# Altium footprint library Footprint.PcbLib: 411 footprints (part 24 of 26)
Each footprint in its own frame and in the unit in brackets; x right, y up, seen from the top. Pads: shape width x height; smd on the part's side, far side on the other; paste and mask are expansions set on the pad; w line width, h text height; cw(c..) or ccw(c..) is an arc to the next point about the centre after c.
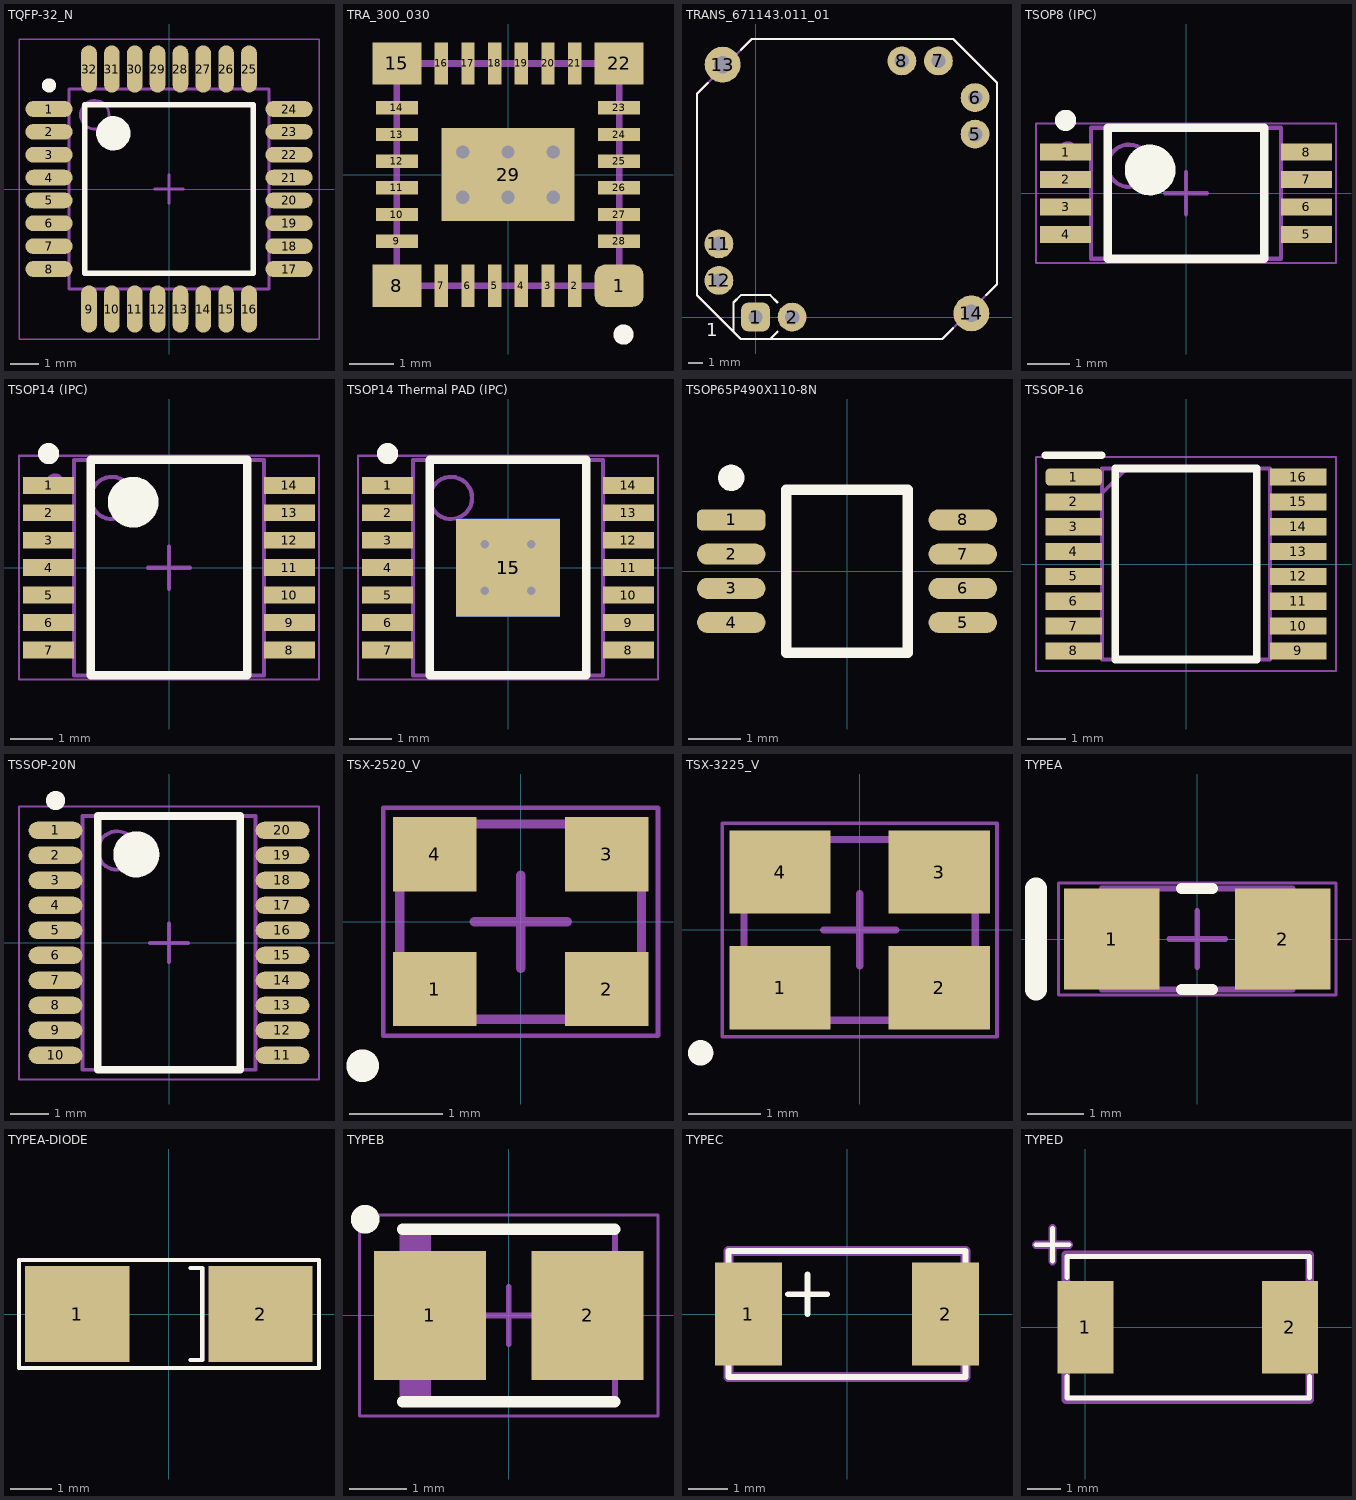
[diagram p23: the footprints below, top view; thin cyan lines are the x and y axes]

## TQFP-32_N [mm] "Thin QFP, 32-Leads, Body 7x7mm, Pitch 0.8mm, IPC Medium Density"
height 1.2
pads (32):
  oval 1.65x0.55 smd: 1(-4.2,2.8) 2(-4.2,2) 3(-4.2,1.2) 4(-4.2,0.4) 5(-4.2,-0.4) 6(-4.2,-1.2) 7(-4.2,-2) 8(-4.2,-2.8) 17(4.2,-2.8) 18(4.2,-2) 19(4.2,-1.2) 20(4.2,-0.4) 21(4.2,0.4) 22(4.2,1.2) 23(4.2,2) 24(4.2,2.8)
  oval 0.55x1.65 smd: 9(-2.8,-4.2) 10(-2,-4.2) 11(-1.2,-4.2) 12(-0.4,-4.2) 13(0.4,-4.2) 14(1.2,-4.2) 15(2,-4.2) 16(2.8,-4.2) 25(2.8,4.2) 26(2,4.2) 27(1.2,4.2) 28(0.4,4.2) 29(-0.4,4.2) 30(-1.2,4.2) 31(-2,4.2) 32(-2.8,4.2)
Top Overlay:
  circle w0.6: c-1.95,1.95 r0.3
  circle w0.25: c-4.2,3.625 r0.125
  lines w0.2: -2.95,-2.95 2.95,-2.95 2.95,2.95 -2.95,2.95 -2.95,-2.95
Mechanical 13:
  circle w0.1: c-2.6,2.6 r0.5
  lines w0.1: -3.5,-3.5 3.5,-3.5 3.5,3.5 -3.5,3.5 -3.5,-3.5
Mechanical 15:
  lines w0.05: -5.25,-5.25 5.25,-5.25 5.25,5.25 -5.25,5.25 -5.25,-5.25
  lines w0.1: -0.5,0 0.5,0 ; 0,-0.5 0,0.5
3D body "TQFP32_CMA_MCH.step": height 1.2, standoff 0, extent -4.496,-4.496 4.496,4.496

## TRA_300_030 [mm]
pads (29):
  rrect50% 1.1x0.95 smd: 1(2.5,-2.5)
  rect 0.3x0.95 smd: 2(1.5,-2.5) 3(0.9,-2.5) 4(0.3,-2.5) 5(-0.3,-2.5) 6(-0.9,-2.5) 7(-1.5,-2.5) 16(-1.5,2.5) 17(-0.9,2.5) 18(-0.3,2.5) 19(0.3,2.5) 20(0.9,2.5) 21(1.5,2.5)
  rect 1.1x0.95 smd: 8(-2.5,-2.5) 15(-2.5,2.5) 22(2.5,2.5)
  rect 0.95x0.3 smd: 9(-2.5,-1.5) 10(-2.5,-0.9) 11(-2.5,-0.3) 12(-2.5,0.3) 13(-2.5,0.9) 14(-2.5,1.5) 23(2.5,1.5) 24(2.5,0.9) 25(2.5,0.3) 26(2.5,-0.3) 27(2.5,-0.9) 28(2.5,-1.5)
  rect 3x2.1 smd: 29(0,0)
via -1.016,-0.508 diameter 0.6 hole 0.3
via 0,-0.508 diameter 0.6 hole 0.3
via 1.016,-0.508 diameter 0.6 hole 0.3
via 1.016,0.508 diameter 0.6 hole 0.3
via 0,0.508 diameter 0.6 hole 0.3
via -1.016,0.508 diameter 0.6 hole 0.3
Top Overlay:
  circle w0.254: c2.6,-3.6 r0.1
Mechanical 1:
  lines w0.15: -2.5,-2.5 2.5,-2.5 2.5,2.5 -2.5,2.5 -2.5,-2.5
3D body: height 1, standoff 0, extent -2.5,-2.5 2.5,2.5

## TRANS_671143.011_01 [mm]
pads (10):
  rrect50% 2x2 hole 1: 1(0,0)
  round 2 hole 1: 2(2.54,0) 5(15.24,12.7) 6(15.24,15.24) 7(12.7,17.78) 8(10.16,17.78) 11(-2.54,5.08) 12(-2.54,2.54)
  round 2.5 hole 1.2: 13(-2.286,17.526) 14(14.986,0.254)
Top Overlay:
  lines w0.15: -3.302,16.256 -4.064,15.494 -4.064,1.524 -1.016,-1.524 12.954,-1.524 13.716,-0.762 ; -1.524,-1.016 -1.524,1.016 -1.016,1.524 1.016,1.524 1.524,1.016 ; -1.016,18.542 -0.254,19.304 13.716,19.304 16.764,16.256 16.764,2.286 16.002,1.524 ; 1.016,-1.524 1.524,-1.016
  text "1" at -3.429,-1.35 h0.9
Mechanical 1:
  lines w0.15: -0.26,19.3 -4.064,15.494 -4.064,1.524 -1.016,-1.524 12.954,-1.524 16.76,2.28 ; -0.254,19.304 13.716,19.304 16.764,16.256 16.764,2.286
  text "1" at -0.56,-0.79 h0.95
3D body: height 16.3, standoff 0, extent -4.064,-1.524 16.764,19.304
3D body: height 16.4, standoff 0, extent -0.744,-0.748 0.75,0.749

## TSOP8 (IPC) [mm] "TSOP, 8-Leads, Body 3.00x4.40mm, Pitch 0.65mm, IPC High Density"
height 1.2
pads (8):
  rect 1.2x0.4 smd: 1(-2.85,0.975) 2(-2.85,0.325) 3(-2.85,-0.325) 4(-2.85,-0.975) 5(2.85,-0.975) 6(2.85,-0.325) 7(2.85,0.325) 8(2.85,0.975)
Top Overlay:
  circle w0.6: c-0.85,0.55 r0.3
  circle w0.25: c-2.85,1.725 r0.125
  lines w0.2: -1.85,-1.55 1.85,-1.55 1.85,1.55 -1.85,1.55 -1.85,-1.55
Mechanical 13:
  circle w0.1: c-1.35,0.65 r0.5
  lines w0.1: -2.25,-1.55 2.25,-1.55 2.25,1.55 -2.25,1.55 -2.25,-1.55
Mechanical 15:
  circle w0.254: c-2.8,1 r0.1
  lines w0.05: -3.55,-1.65 3.55,-1.65 3.55,1.65 -3.55,1.65 -3.55,-1.65
  lines w0.1: -0.5,0 0.5,0 ; 0,-0.5 0,0.5
  text ".Designator" at -2.5,2 h1.52
3D body "TSOP65P640X120-8L.step": height 1.2, standoff 0, extent -3.2,-1.55 3.2,1.55

## TSOP14 (IPC) [mm] "TSOP, 14-Leads, Body 5.00x4.40mm, Pitch 0.65mm, IPC High Density"
height 1.2
pads (14):
  rect 1.2x0.4 smd: 1(-2.85,1.95) 2(-2.85,1.3) 3(-2.85,0.65) 4(-2.85,0) 5(-2.85,-0.65) 6(-2.85,-1.3) 7(-2.85,-1.95) 8(2.85,-1.95) 9(2.85,-1.3) 10(2.85,-0.65) 11(2.85,0) 12(2.85,0.65) 13(2.85,1.3) 14(2.85,1.95)
Top Overlay:
  circle w0.25: c-2.85,2.7 r0.125
  circle w0.6: c-0.85,1.55 r0.3
  lines w0.2: -1.85,-2.55 -1.85,2.55 1.85,2.55 1.85,-2.55 -1.85,-2.55
Mechanical 13:
  circle w0.1: c-1.35,1.65 r0.5
  lines w0.1: -2.25,-2.55 -2.25,2.55 2.25,2.55 2.25,-2.55 -2.25,-2.55
Mechanical 15:
  circle w0.254: c-2.7,2 r0.1
  lines w0.05: -3.55,-2.65 -3.55,2.65 3.55,2.65 3.55,-2.65 -3.55,-2.65
  lines w0.1: -0.5,0 0.5,0 ; 0,-0.5 0,0.5
  text ".Designator" at -2.5,3 h1.52
3D body "TSOP65P640X120-14L.step": height 1.2, standoff 0, extent -3.2,-2.55 3.2,2.55

## TSOP14 Thermal PAD (IPC) [mm] "TSOP, 14-Leads, Body 4.85x4.40mm, Pitch 0.65mm, Thermal Pad 2.31x2.46mm, IPC High Density"
height 1.2
pads (16):
  rect 1.2x0.4 smd: 1(-2.85,1.95) 2(-2.85,1.3) 3(-2.85,0.65) 4(-2.85,0) 5(-2.85,-0.65) 6(-2.85,-1.3) 7(-2.85,-1.95) 8(2.85,-1.95) 9(2.85,-1.3) 10(2.85,-0.65) 11(2.85,0) 12(2.85,0.65) 13(2.85,1.3) 14(2.85,1.95)
  rect 2.46x2.31 smd: 15(0,0)
  rect 2.46x2.31 smd far side: 15(0,0)
via 0.55,-0.55 diameter 0.5 hole 0.2
via -0.55,-0.55 diameter 0.5 hole 0.2
via 0.55,0.55 diameter 0.5 hole 0.2
via -0.55,0.55 diameter 0.5 hole 0.2
Top Overlay:
  circle w0.25: c-2.85,2.7 r0.125
  lines w0.2: -1.85,-2.55 1.85,-2.55 1.85,2.55 -1.85,2.55 -1.85,-2.55
Mechanical 15:
  circle w0.1: c-1.35,1.65 r0.5
  lines w0.05: -3.55,-2.65 3.55,-2.65 3.55,2.65 -3.55,2.65 -3.55,-2.65
  lines w0.1: -0.5,0 0.5,0 ; 0,-0.5 0,0.5 ; -2.25,-2.55 2.25,-2.55 2.25,2.55 -2.25,2.55 -2.25,-2.55
  text ".Designator" at -2.5,3 h1.52
3D body "TSOP65P640X120_HS-15L.step": height 1.2, standoff 0, extent -3.2,-2.55 3.2,2.55

## TSOP65P490X110-8N [mm] "TSOP, 8-Leads, Body 3,00x3,00mm, Pitch 0,65mm, IPC Medium Density"
height 1.1
pads (8):
  rrect50% 1.3x0.4 smd: 1(-2.2,0.975)
  oval 1.3x0.4 smd: 2(-2.2,0.325) 3(-2.2,-0.325) 4(-2.2,-0.975) 5(2.2,-0.975) 6(2.2,-0.325) 7(2.2,0.325) 8(2.2,0.975)
Top Overlay:
  circle w0.25: c-2.2,1.775 r0.125
  lines w0.2: -1.15,-1.55 -1.15,1.55 1.15,1.55 1.15,-1.55 -1.15,-1.55
3D body "TSOP65P490X110-8N.step": height 1.1, standoff 0, extent -2.45,-1.55 2.45,1.55

## TSSOP-16 [mm]
pads (16):
  rrect50% 1.475x0.45 smd: 1(-2.938,2.275)
  rect 1.475x0.45 smd: 2(-2.938,1.625) 3(-2.938,0.975) 4(-2.938,0.325) 5(-2.938,-0.325) 6(-2.938,-0.975) 7(-2.938,-1.625) 8(-2.938,-2.275) 9(2.938,-2.275) 10(2.938,-1.625) 11(2.938,-0.975) 12(2.938,-0.325) 13(2.938,0.325) 14(2.938,0.975) 15(2.938,1.625) 16(2.938,2.275)
Top Overlay:
  lines w0.2: -3.675,2.85 -2.2,2.85 ; -1.85,-2.5 -1.85,2.5 1.85,2.5 1.85,-2.5 -1.85,-2.5
Mechanical 13:
  lines w0.1: -2.2,1.85 -1.55,2.5 ; -2.2,-2.5 -2.2,2.5 2.2,2.5 2.2,-2.5 -2.2,-2.5
Mechanical 15:
  lines w0.05: -3.925,-2.8 -3.925,2.8 3.925,2.8 3.925,-2.8 -3.925,-2.8
3D body "ADG709BRUZ.stp": height 1.2, standoff 0, extent -3.2,-2.5 3.2,2.5

## TSSOP-20N [mm] "TSSOP, 20-Leads, Body 6,50x4,40mm, Pitch 0,65mm, IPC Medium Density"
height 1.2
pads (20):
  oval 1.4x0.45 smd: 1(-2.95,2.925) 2(-2.95,2.275) 3(-2.95,1.625) 4(-2.95,0.975) 5(-2.95,0.325) 6(-2.95,-0.325) 7(-2.95,-0.975) 8(-2.95,-1.625) 9(-2.95,-2.275) 10(-2.95,-2.925) 11(2.95,-2.925) 12(2.95,-2.275) 13(2.95,-1.625) 14(2.95,-0.975) 15(2.95,-0.325) 16(2.95,0.325) 17(2.95,0.975) 18(2.95,1.625) 19(2.95,2.275) 20(2.95,2.925)
Top Overlay:
  circle w0.6: c-0.85,2.3 r0.3
  circle w0.25: c-2.95,3.7 r0.125
  lines w0.2: -1.85,-3.3 1.85,-3.3 1.85,3.3 -1.85,3.3 -1.85,-3.3
Assembly Top:
  circle w0.1: c-1.35,2.4 r0.5
  lines w0.1: -2.25,-3.3 2.25,-3.3 2.25,3.3 -2.25,3.3 -2.25,-3.3
Courtyard Top:
  lines w0.05: -3.9,-3.55 3.9,-3.55 3.9,3.55 -3.9,3.55 -3.9,-3.55
  lines w0.1: -0.5,0 0.5,0 ; 0,-0.5 0,0.5
3D body "TSSOP-20N.step": height 1.2, standoff 0, extent -3.2,-3.3 3.2,3.3

## TSX-2520_V [mm] "SMD, 4-Leads, Body 2.5x2.0mm"
height 0.9
pads (4):
  rect 0.9x0.8 smd: 1(-0.925,-0.725) 2(0.925,-0.725) 3(0.925,0.725) 4(-0.925,0.725)
Top Overlay:
  circle w0.25: c-1.7,-1.55 r0.05
Mechanical 13:
  lines w0.1: -1.3,-1.05 1.3,-1.05 1.3,1.05 -1.3,1.05 -1.3,-1.05
Mechanical 15:
  lines w0.05: -1.477,-1.227 -1.477,1.227 1.477,1.227 1.477,-1.227 -1.477,-1.227
  lines w0.1: -0.5,0 0.5,0 ; 0,-0.5 0,0.5
3D body: height 0.9, standoff 0, extent -1.29,-1.051 1.3,1.054

## TSX-3225_V [mm] "SMD, 4-Leads, Body 3.2x2.5mm"
height 0.6
pads (4):
  rect 1.4x1.15 smd: 1(-1.1,-0.8) 2(1.1,-0.8) 3(1.1,0.8) 4(-1.1,0.8)
Top Overlay:
  circle w0.25: c-2.2,-1.7 r0.05
Mechanical 13:
  lines w0.1: -1.6,-1.25 -1.6,1.25 1.6,1.25 1.6,-1.25 -1.6,-1.25
Mechanical 15:
  lines w0.05: -1.9,-1.475 1.9,-1.475 1.9,1.475 -1.9,1.475 -1.9,-1.475
  lines w0.1: -0.5,0 0.5,0 ; 0,-0.5 0,0.5
3D body: height 0.6, standoff 0, extent -1.6,-1.25 1.6,1.25

## TYPEA [mm] "Molded Capacitor, 2-Leads, Body 3.40x1.80mm"
height 1.8
pads (2):
  rect 1.7x1.8 smd: 1(-1.525,0) 2(1.525,0)
Top Overlay:
  lines w0.2: -0.275,-0.9 0.275,-0.9 ; -0.275,0.9 0.275,0.9
  lines w0.4: -2.875,-0.9 -2.875,0.9
Mechanical 13:
  rectangle: -1.7,-0.9 -1.243,0.9
  lines w0.1: -1.7,-0.9 -1.7,0.9 1.7,0.9 1.7,-0.9 -1.7,-0.9
Mechanical 15:
  lines w0.05: -2.475,-1 -2.475,1 2.475,1 2.475,-1 -2.475,-1
  lines w0.1: -0.5,0 0.5,0 ; 0,-0.5 0,0.5
3D body "CAPMP3216X18L.step": height 1.8, standoff 0, extent -1.92,-0.9 1.92,0.9

## TYPEA-DIODE [mm]
pads (2):
  rect 2.5x2.3 smd: 1(-2.2,0) 2(2.2,0)
Top Overlay:
  lines w0.1: -3.6,-1.3 -3.6,1.3 3.6,1.3 3.6,-1.3 -3.58,-1.3 ; 0.52,-1.1 0.8,-1.1 0.8,1.1 0.52,1.1
Mechanical 15:
  lines w0.1: -3.6,-1.3 -3.6,1.3 3.6,1.3 3.6,-1.3 -3.58,-1.3 ; 0.52,-1.1 0.8,-1.1 0.8,1.1 0.52,1.1
  text ".Designator" at -3.3,1.5 h1.52

## TYPEB [mm] "Molded Capacitor, 2-Leads, Body 3.7x3mm, IPC Medium Density"
height 2.1
pads (2):
  rect 1.95x2.25 smd: 1(-1.375,0) 2(1.375,0)
Top Overlay:
  circle w0.25: c-2.5,1.675 r0.125
  lines w0.2: -1.85,-1.5 1.85,-1.5 ; -1.85,1.5 1.85,1.5
Mechanical 13:
  region: -1.352,1.5 -1.85,1.5 -1.85,-1.5 -1.352,-1.5
  lines w0.1: -1.85,-1.5 -1.85,1.5 1.85,1.5 1.85,-1.5 -1.85,-1.5
Mechanical 15:
  lines w0.05: -2.6,-1.75 -2.6,1.75 2.6,1.75 2.6,-1.75 -2.6,-1.75
  lines w0.1: -0.5,0 0.5,0 ; 0,-0.5 0,0.5
3D body "T520B337M2R5ATE045.step": height 2.11, standoff 0.01, extent -1.85,-1.5 1.85,1.5

## TYPEC [mm]
pads (2):
  rect 1.7x2.6 smd: 1(-2.5,0) 2(2.5,0)
Top Overlay:
  lines w0.15: -1.5,0.5 -0.5,0.5 ; -1,0 -1,1 ; -3,-1.6 3,-1.6 3,1.6 -3,1.6 -3,-1.6
Mechanical 15:
  lines w0.254: -3,-1.6 -3,1.6 3,1.6 3,-1.6 -3,-1.6
  text ".Designator" at -2.6,2 h1.52

## TYPED [mm]
pads (2):
  rect 1.7x2.8 smd: 1(0,0) 2(6.2,0)
Top Overlay:
  lines w0.15: -1.5,2.5 -0.5,2.5 ; -1,2 -1,3 ; -0.56,-2.15 -0.56,-1.5 ; -0.56,1.5 -0.56,2.15 ; -0.55,-2.15 6.75,-2.15 ; -0.55,2.15 6.75,2.15 ; 6.79,-2.15 6.79,-1.5 ; 6.79,1.5 6.79,2.15
Mechanical 15:
  lines w0.254: -1.5,2.5 -0.5,2.5 ; -1,2 -1,3 ; -0.6,-2.2 -0.6,2.2 6.8,2.2 6.8,-2.2 -0.6,-2.2
  text ".Designator" at 0.1,2.5 h1.52